# Altium schematic symbol library Schlib1.SchLib: 3 symbols
Pins are listed as number, name and electrical type; pins without a type are passive.

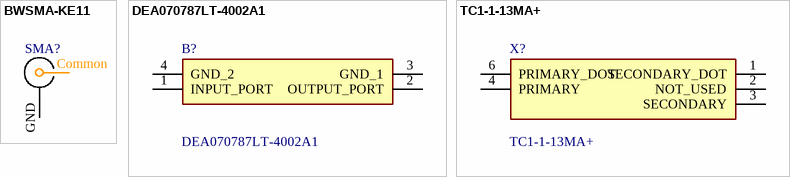
[diagram p0: symbols BWSMA-KE11 to TC1-1-13MA+]

## BWSMA-KE11
designator SMA?, comment SMA  (value not drawn)
Part Number: BWSMA-KE11; SMD_or_DIP: SMD; Vertical_or_Horizontal: Horizontal; Value: SMD_Horizontal; JLCPCB Part #: C5250058; Connector_Type: SMA; Max_Frequency: ?; ComponentLink1URL: https://jlcpcb.com/api/file/downloadByFileSystemAccessId/8590456158969360384; ComponentLink1Description: Datasheet; JLCRotOffset: -90
footprint SMA_BWSMA-KE11
pins: Common, GND

## DEA070787LT-4002A1
designator B?
Filters, Pass Band=777 to 787MHz, Zc=50se; Manufacturer_Name: TDK; Geometry.Height: 0.3mm; Mouser Part Number: 810-DEA070787LT42A1; Mouser Price/Stock: https://www.mouser.co.uk/ProductDetail/TDK/DEA070787LT-4002A1?qs=t7xnP681wgWsMS%252BzXDdMJg%3D%3D; Manufacturer_Part_Number: DEA070787LT-4002A1; Datasheet Link: https://product.tdk.com/system/files/dam/doc/product/rf/rf/filter/catalog/rf_lpf_dea070787lt-4002a1_en.pdf
footprint DEA070787LT4002A1
pins: 1 INPUT_PORT, 2 OUTPUT_PORT, 3 GND_1, 4 GND_2

## TC1-1-13MA+
designator X?
RF TRANSFORMER, 4.5 - 3000 MHZ,; Manufacturer_Name: Mini-Circuits; Geometry.Height: 4.06mm; Mouser Part Number: 139-TC1-1-13MA; Mouser Price/Stock: https://www.mouser.co.uk/ProductDetail/Mini-Circuits/TC1-1-13MA%2b?qs=xZ%2FP%252Ba9zWqaQyucfPXsKqA%3D%3D; Manufacturer_Part_Number: TC1-1-13MA+; Datasheet Link: TC1-1-13MA+
footprint TC1113MA
pins: 1 SECONDARY_DOT, 2 NOT_USED, 3 SECONDARY, 4 PRIMARY, 6 PRIMARY_DOT